# Altium footprint library WR-MPC3.PcbLib: 235 footprints (part 10 of 15)
Each footprint in its own frame and in the unit in brackets; x right, y up, seen from the top. Pads: shape width x height; smd on the part's side, far side on the other; paste and mask are expansions set on the pad; w line width, h text height; cw(c..) or ccw(c..) is an arc to the next point about the centre after c.
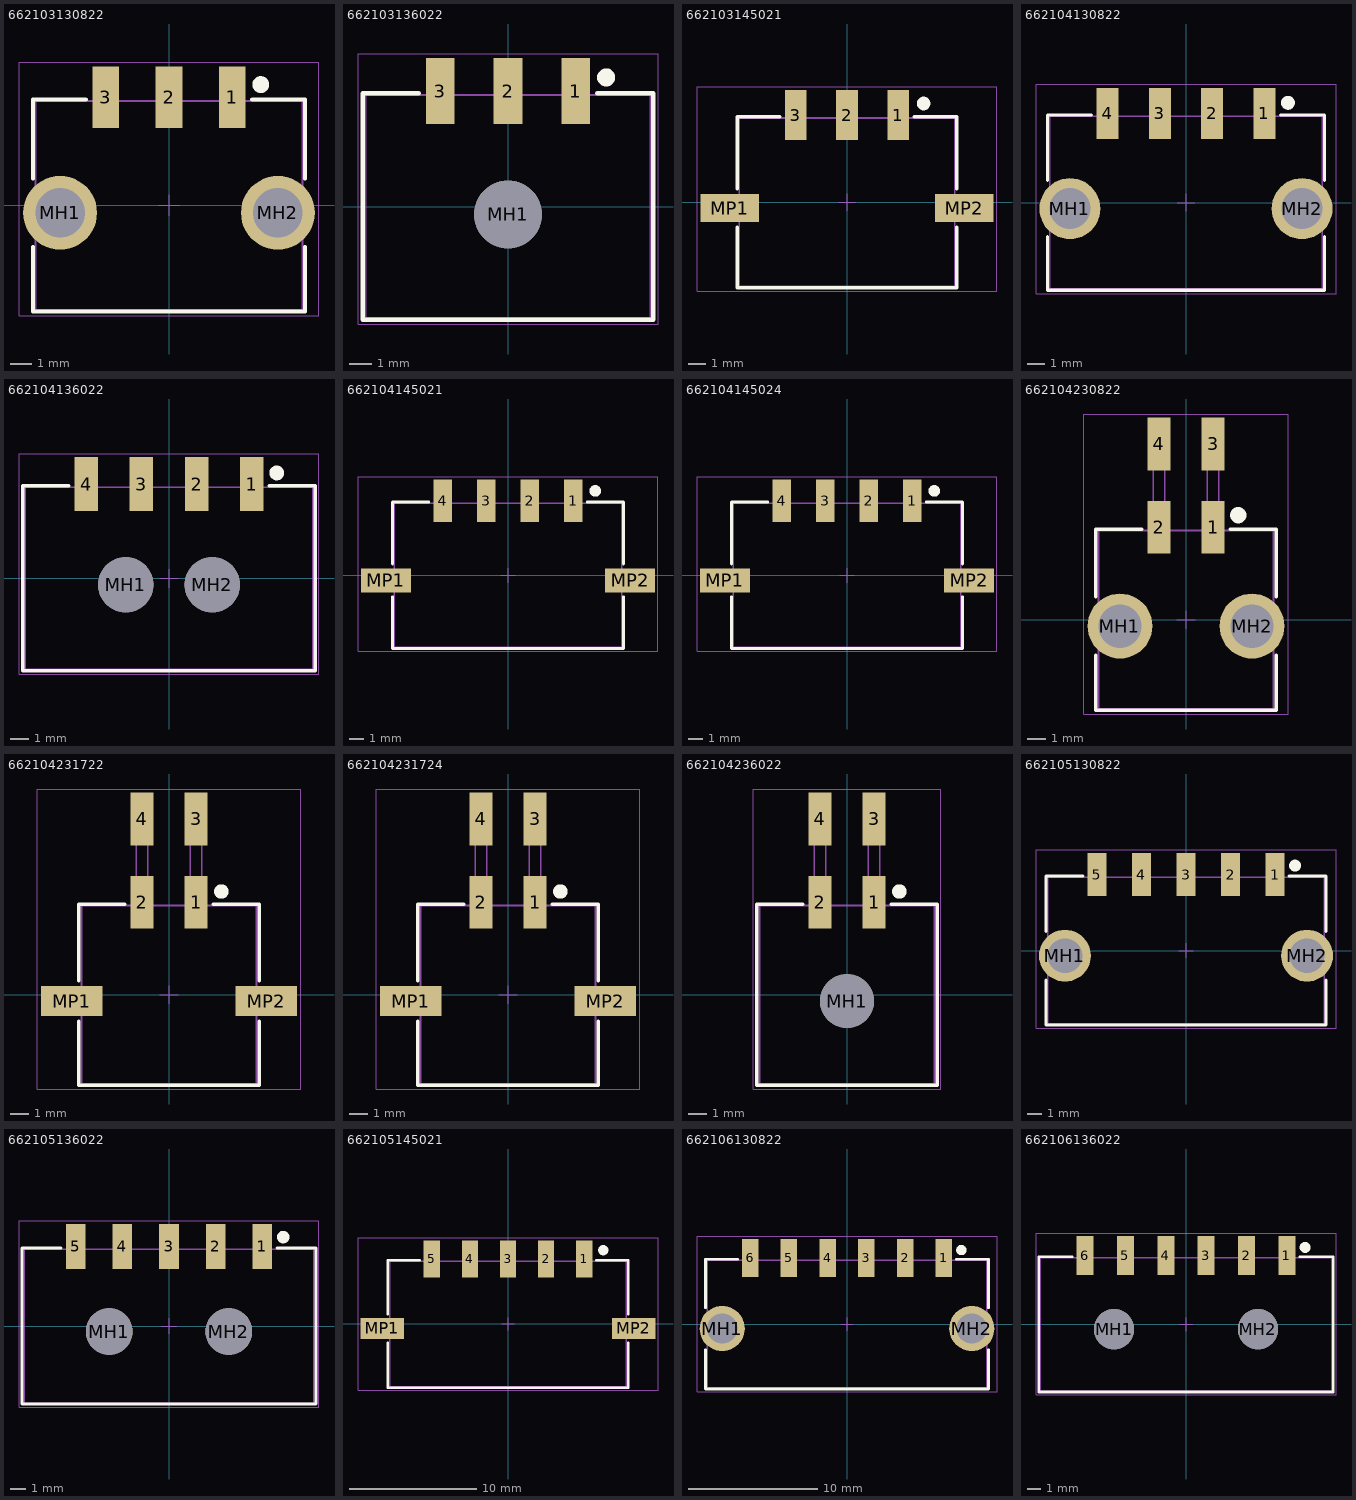
[diagram p9: the footprints below, top view; thin cyan lines are the x and y axes]

## 662103130822 [mm] "3.00mm SMT Male Single Row Angled Header with THT Retention Clip, 3p"
height 5.57
pads (5):
  rect 1.27x2.92 smd: 1(3,5.12) 2(0,5.12) 3(-3,5.12)
  round 3.5 hole 2.35: MH1(-5.16,-0.35) MH2(5.16,-0.35)
Top Overlay:
  circle w0.4: c4.35,5.725 r0.2
  lines w0.2: -6.45,-1.975 -6.45,-5.025 6.45,-5.025 6.45,-1.975 ; -6.45,1.275 -6.45,5.025 -3.95,5.025 ; 3.95,5.025 6.45,5.025 6.45,1.275
Top Designator:
  text ".Designator" at -7.498,-0.5 h1.5
Top Component Outline:
  lines w0.1: -3.32,4.95 -3.32,6.4 -2.68,6.4 -2.68,4.95 ; -0.32,4.95 -0.32,6.4 0.32,6.4 0.32,4.95 ; 2.68,4.95 2.68,6.4 3.32,6.4 3.32,4.95 ; -6.325,-4.95 6.325,-4.95 6.325,4.95 -6.325,4.95 -6.325,-4.95
Top 3D Body:
  lines w0.1: -3.32,4.95 -3.32,6.4 -2.68,6.4 -2.68,4.95 ; -0.32,4.95 -0.32,6.4 0.32,6.4 0.32,4.95 ; 2.68,4.95 2.68,6.4 3.32,6.4 3.32,4.95 ; -6.325,-4.95 6.325,-4.95 6.325,4.95 -6.325,4.95 -6.325,-4.95
Top Courtyard:
  lines w0.05: -7.11,-5.225 7.11,-5.225 7.11,6.78 -7.11,6.78 -7.11,-5.225
Top Component Center:
  lines w0.05: -0.5,0 0.5,0 ; 0,-0.5 0,0.5
3D body "662103130822.stp": height 5.61, standoff -2.01, extent -6.325,-4.95 6.325,6.398

## 662103136022 [mm] "3.00mm SMT Male Right Angled Header with Snap-In Plastic Pegs, 3p"
height 5.57
pads (4):
  rect 1.27x2.92 smd: 1(3,5.12) 2(0,5.12) 3(-3,5.12)
  round 3 hole 3 unplated: MH1(0,-0.35)
Top Overlay:
  circle w0.4: c4.35,5.725 r0.2
  lines w0.2: -3.95,5.025 -6.45,5.025 -6.45,-5.025 6.45,-5.025 6.45,5.025 3.95,5.025
Top Designator:
  text ".Designator" at -7.498,-0.5 h1.5
Top Component Outline:
  lines w0.1: -3.32,4.95 -3.32,6.4 -2.68,6.4 -2.68,4.95 ; -0.32,4.95 -0.32,6.4 0.32,6.4 0.32,4.95 ; 2.68,4.95 2.68,6.4 3.32,6.4 3.32,4.95 ; -6.325,-4.95 -6.325,4.95 6.325,4.95 6.325,-4.95 -6.325,-4.95
Top 3D Body:
  lines w0.1: -3.32,4.95 -3.32,6.4 -2.68,6.4 -2.68,4.95 ; -0.32,4.95 -0.32,6.4 0.32,6.4 0.32,4.95 ; 2.68,4.95 2.68,6.4 3.32,6.4 3.32,4.95 ; -6.325,-4.95 -6.325,4.95 6.325,4.95 6.325,-4.95 -6.325,-4.95
Top Courtyard:
  lines w0.05: -6.65,-5.225 -6.65,6.78 6.65,6.78 6.65,-5.225 -6.65,-5.225
Top Component Center:
  lines w0.05: -0.5,0 0.5,0 ; 0,-0.5 0,0.5
3D body "662103136022.stp": height 5.6, standoff -3.17, extent -6.325,-4.95 6.325,6.398

## 662103145021 [mm] "3.00mm Male Single Row Angled Header, 3p"
height 5.57
pads (5):
  rect 1.27x2.92 smd: 1(3,5.12) 2(0,5.12) 3(-3,5.12)
  rect 3.43x1.65 smd: MP1(-6.895,-0.35) MP2(6.895,-0.35)
Top Overlay:
  circle w0.4: c4.5,5.8 r0.2
  lines w0.2: -6.45,-1.475 -6.45,-5.025 6.45,-5.025 6.45,-1.475 ; -6.45,0.775 -6.45,5.025 -3.95,5.025 ; 3.95,5.025 6.45,5.025 6.45,0.775
Top Designator:
  text ".Designator" at -7.498,-0.5 h1.5
Top Component Outline:
  lines w0.1: -6.325,-1 -8.325,-1 -8.325,0.3 -6.325,0.3 ; -3.32,4.95 -3.32,6.4 -2.68,6.4 -2.68,4.95 ; -0.32,4.95 -0.32,6.4 0.32,6.4 0.32,4.95 ; 2.68,4.95 2.68,6.4 3.32,6.4 3.32,4.95 ; 6.325,-1 8.325,-1 8.325,0.3 6.325,0.3 ; -6.325,-4.95 -6.325,4.95 6.325,4.95 6.325,-4.95 -6.325,-4.95
Top 3D Body:
  lines w0.1: -6.325,-1 -8.325,-1 -8.325,0.3 -6.325,0.3 ; -3.32,4.95 -3.32,6.4 -2.68,6.4 -2.68,4.95 ; -0.32,4.95 -0.32,6.4 0.32,6.4 0.32,4.95 ; 2.68,4.95 2.68,6.4 3.32,6.4 3.32,4.95 ; 6.325,-1 8.325,-1 8.325,0.3 6.325,0.3 ; -6.325,-4.95 -6.325,4.95 6.325,4.95 6.325,-4.95 -6.325,-4.95
Top Courtyard:
  lines w0.05: -8.81,-5.225 -8.81,6.78 8.81,6.78 8.81,-5.225 -8.81,-5.225
Top Component Center:
  lines w0.05: -0.5,0 0.5,0 ; 0,-0.5 0,0.5
3D body "662103145021.stp": height 5.61, standoff -0.03, extent -8.323,-4.95 8.323,6.403

## 662104130822 [mm] "3.00mm SMT Male Single Row Angled Header with THT Retention Clip, 4p"
height 5.57
pads (6):
  rect 1.27x2.92 smd: 1(4.5,5.12) 2(1.5,5.12) 3(-1.5,5.12) 4(-4.5,5.12)
  round 3.5 hole 2.35: MH1(-6.66,-0.35) MH2(6.66,-0.35)
Top Overlay:
  circle w0.4: c5.85,5.725 r0.2
  lines w0.2: -7.95,-1.975 -7.95,-5.025 7.95,-5.025 7.95,-1.975 ; -7.95,1.275 -7.95,5.025 -5.45,5.025 ; 5.45,5.025 7.95,5.025 7.95,1.275
Top Designator:
  text ".Designator" at -7.498,-0.5 h1.5
Top Component Outline:
  lines w0.1: -4.82,4.95 -4.82,6.4 -4.18,6.4 -4.18,4.95 ; -1.82,4.95 -1.82,6.4 -1.18,6.4 -1.18,4.95 ; 1.18,4.95 1.18,6.4 1.82,6.4 1.82,4.95 ; 4.18,4.95 4.18,6.4 4.82,6.4 4.82,4.95 ; -7.825,-4.95 7.825,-4.95 7.825,4.95 -7.825,4.95 -7.825,-4.95
Top 3D Body:
  lines w0.1: -4.82,4.95 -4.82,6.4 -4.18,6.4 -4.18,4.95 ; -1.82,4.95 -1.82,6.4 -1.18,6.4 -1.18,4.95 ; 1.18,4.95 1.18,6.4 1.82,6.4 1.82,4.95 ; 4.18,4.95 4.18,6.4 4.82,6.4 4.82,4.95 ; -7.825,-4.95 -7.825,4.95 7.825,4.95 7.825,-4.95 -7.825,-4.95
Top Courtyard:
  lines w0.05: -8.61,-5.225 -8.61,6.78 8.61,6.78 8.61,-5.225 -8.61,-5.225
Top Component Center:
  lines w0.05: -0.5,0 0.5,0 ; 0,-0.5 0,0.5
3D body "662104130822.stp": height 5.61, standoff -2.01, extent -7.825,-4.95 7.825,6.398

## 662104136022 [mm] "3.00mm SMT Male Right Angled Header with Snap-In Plastic Pegs, 4p"
height 5.57
pads (6):
  rect 1.27x2.92 smd: 1(4.5,5.12) 2(1.5,5.12) 3(-1.5,5.12) 4(-4.5,5.12)
  round 3 hole 3 unplated: MH1(-2.35,-0.35) MH2(2.35,-0.35)
Top Overlay:
  circle w0.4: c5.85,5.725 r0.2
  lines w0.2: -5.45,5.025 -7.95,5.025 -7.95,-5.025 7.95,-5.025 7.95,5.025 5.45,5.025
Top Designator:
  text ".Designator" at -7.498,-0.5 h1.5
Top Component Outline:
  lines w0.1: -4.82,4.95 -4.82,6.4 -4.18,6.4 -4.18,4.95 ; -1.82,4.95 -1.82,6.4 -1.18,6.4 -1.18,4.95 ; 1.18,4.95 1.18,6.4 1.82,6.4 1.82,4.95 ; 4.18,4.95 4.18,6.4 4.82,6.4 4.82,4.95 ; -7.825,-4.95 -7.825,4.95 7.825,4.95 7.825,-4.95 -7.825,-4.95
Top 3D Body:
  lines w0.1: -4.82,4.95 -4.82,6.4 -4.18,6.4 -4.18,4.95 ; -1.82,4.95 -1.82,6.4 -1.18,6.4 -1.18,4.95 ; 1.18,4.95 1.18,6.4 1.82,6.4 1.82,4.95 ; 4.18,4.95 4.18,6.4 4.82,6.4 4.82,4.95 ; -7.825,-4.95 -7.825,4.95 7.825,4.95 7.825,-4.95 -7.825,-4.95
Top Courtyard:
  lines w0.05: -8.15,-5.225 -8.15,6.78 8.15,6.78 8.15,-5.225 -8.15,-5.225
Top Component Center:
  lines w0.05: -0.5,0 0.5,0 ; 0,-0.5 0,0.5
3D body "662104136022.stp": height 5.6, standoff -3.17, extent -7.825,-4.95 7.825,6.398

## 662104145021 [mm] "3.00mm Male Single Row Angled Header, 4p"
height 5.57
pads (6):
  rect 1.27x2.92 smd: 1(4.5,5.12) 2(1.5,5.12) 3(-1.5,5.12) 4(-4.5,5.12)
  rect 3.43x1.65 smd: MP1(-8.395,-0.35) MP2(8.395,-0.35)
Top Overlay:
  circle w0.4: c6,5.8 r0.2
  lines w0.2: -7.95,-1.475 -7.95,-5.025 7.95,-5.025 7.95,-1.475 ; -7.95,0.775 -7.95,5.025 -5.45,5.025 ; 5.45,5.025 7.95,5.025 7.95,0.775
Top Designator:
  text ".Designator" at -7.498,-0.5 h1.5
Top Component Outline:
  lines w0.1: -7.825,-1 -9.825,-1 -9.825,0.3 -7.825,0.3 ; -4.82,4.95 -4.82,6.4 -4.18,6.4 -4.18,4.95 ; -1.82,4.95 -1.82,6.4 -1.18,6.4 -1.18,4.95 ; 1.18,4.95 1.18,6.4 1.82,6.4 1.82,4.95 ; 4.18,4.95 4.18,6.4 4.82,6.4 4.82,4.95 ; 7.825,-1 9.825,-1 9.825,0.3 7.825,0.3 ; -7.825,-4.95 7.825,-4.95 7.825,4.95 -7.825,4.95 -7.825,-4.95
Top 3D Body:
  lines w0.1: -7.825,-1 -9.825,-1 -9.825,0.3 -7.825,0.3 ; -4.82,4.95 -4.82,6.4 -4.18,6.4 -4.18,4.95 ; -1.82,4.95 -1.82,6.4 -1.18,6.4 -1.18,4.95 ; 1.18,4.95 1.18,6.4 1.82,6.4 1.82,4.95 ; 4.18,4.95 4.18,6.4 4.82,6.4 4.82,4.95 ; 7.825,-1 9.825,-1 9.825,0.3 7.825,0.3 ; -7.825,-4.95 7.825,-4.95 7.825,4.95 -7.825,4.95 -7.825,-4.95
Top Courtyard:
  lines w0.05: -10.31,-5.225 -10.31,6.78 10.31,6.78 10.31,-5.225 -10.31,-5.225
Top Component Center:
  lines w0.05: -0.5,0 0.5,0 ; 0,-0.5 0,0.5
3D body "662104145021.stp": height 5.61, standoff -0.03, extent -9.823,-4.95 9.823,6.403

## 662104145024 [mm] "3.00mm Male Single Row Angled Header, 4p"
height 5.57
pads (6):
  rect 1.27x2.92 smd: 1(4.5,5.12) 2(1.5,5.12) 3(-1.5,5.12) 4(-4.5,5.12)
  rect 3.43x1.65 smd: MP1(-8.395,-0.35) MP2(8.395,-0.35)
Top Overlay:
  circle w0.4: c6,5.8 r0.2
  lines w0.2: -7.95,-1.475 -7.95,-5.025 7.95,-5.025 7.95,-1.475 ; -7.95,0.775 -7.95,5.025 -5.45,5.025 ; 5.45,5.025 7.95,5.025 7.95,0.775
Top Designator:
  text ".Designator" at -7.498,-0.5 h1.5
Top Component Outline:
  lines w0.1: -7.825,-1 -9.825,-1 -9.825,0.3 -7.825,0.3 ; -4.82,4.95 -4.82,6.4 -4.18,6.4 -4.18,4.95 ; -1.82,4.95 -1.82,6.4 -1.18,6.4 -1.18,4.95 ; 1.18,4.95 1.18,6.4 1.82,6.4 1.82,4.95 ; 4.18,4.95 4.18,6.4 4.82,6.4 4.82,4.95 ; 7.825,-1 9.825,-1 9.825,0.3 7.825,0.3 ; -7.825,-4.95 7.825,-4.95 7.825,4.95 -7.825,4.95 -7.825,-4.95
Top 3D Body:
  lines w0.1: -7.825,-1 -9.825,-1 -9.825,0.3 -7.825,0.3 ; -4.82,4.95 -4.82,6.4 -4.18,6.4 -4.18,4.95 ; -1.82,4.95 -1.82,6.4 -1.18,6.4 -1.18,4.95 ; 1.18,4.95 1.18,6.4 1.82,6.4 1.82,4.95 ; 4.18,4.95 4.18,6.4 4.82,6.4 4.82,4.95 ; 7.825,-1 9.825,-1 9.825,0.3 7.825,0.3 ; -7.825,-4.95 7.825,-4.95 7.825,4.95 -7.825,4.95 -7.825,-4.95
Top Courtyard:
  lines w0.05: -10.31,-5.225 -10.31,6.78 10.31,6.78 10.31,-5.225 -10.31,-5.225
Top Component Center:
  lines w0.05: -0.5,0 0.5,0 ; 0,-0.5 0,0.5
3D body "662104145024.stp": height 5.61, standoff -0.03, extent -9.823,-4.95 9.823,6.403

## 662104230822 [mm] "3.00mm SMT Male Dual Row Angled Header with THT Retention Clip, 4p"
height 8.26
pads (6):
  rect 1.27x2.92 smd: 1(1.5,5.13) 2(-1.5,5.13) 3(1.5,9.75) 4(-1.5,9.75)
  round 3.6 hole 2.41: MH1(-3.66,-0.35) MH2(3.66,-0.35)
Top Overlay:
  circle w0.5: c2.9,5.8 r0.2
  lines w0.2: -5,-1.975 -5,-5.025 5,-5.025 5,-1.975 ; -5,1.275 -5,5.025 -2.45,5.025 ; 2.45,5.025 5,5.025 5,1.275
Top Designator:
  text ".Designator" at -7.498,-0.5 h1.5
Top Component Outline:
  lines w0.1: -1.82,4.95 -1.82,10.95 -1.18,10.95 -1.18,4.95 ; -1.82,6.3 -1.18,6.3 ; 1.18,4.95 1.18,10.95 1.82,10.95 1.82,4.95 ; 1.18,6.3 1.82,6.3 ; -4.85,-4.95 4.85,-4.95 4.85,4.95 -4.85,4.95 -4.85,-4.95
Top 3D Body:
  lines w0.1: -1.82,4.95 -1.82,10.95 -1.18,10.95 -1.18,4.95 ; -1.82,6.3 -1.18,6.3 ; 1.18,4.95 1.18,10.95 1.82,10.95 1.82,4.95 ; 1.18,6.3 1.82,6.3 ; -4.85,-4.95 4.85,-4.95 4.85,4.95 -4.85,4.95 -4.85,-4.95
Top Courtyard:
  lines w0.05: -5.66,-5.225 -5.66,11.41 5.66,11.41 5.66,-5.225 -5.66,-5.225
Top Component Center:
  lines w0.05: -0.5,0 0.5,0 ; 0,-0.5 0,0.5
3D body "662104230822.stp": height 8.79, standoff -3.07, extent -4.85,-4.95 4.85,10.95

## 662104231722 [mm] "3.00mm SMT Male Dual Row Angled Header with SMT Solder Tab (Reel), 4p"
height 8.26
pads (6):
  rect 1.27x2.92 smd: 1(1.5,5.13) 2(-1.5,5.13) 3(1.5,9.75) 4(-1.5,9.75)
  rect 3.43x1.65 smd: MP1(-5.395,-0.35) MP2(5.395,-0.35)
Top Overlay:
  circle w0.4: c2.9,5.725 r0.2
  lines w0.2: -5,-1.475 -5,-5.025 5,-5.025 5,-1.475 ; -5,0.775 -5,5.025 -2.45,5.025 ; 2.45,5.025 5,5.025 5,0.775
Top Designator:
  text ".Designator" at -7.498,-0.5 h1.5
Top Component Outline:
  lines w0.1: -4.85,-1.1 -6.55,-1.1 -6.55,0.4 -4.85,0.4 ; -1.82,4.95 -1.82,10.95 -1.18,10.95 -1.18,4.95 ; -1.82,6.3 -1.18,6.3 ; 1.18,4.95 1.18,10.95 1.82,10.95 1.82,4.95 ; 1.18,6.3 1.82,6.3 ; 4.85,-1.1 6.55,-1.1 6.55,0.4 4.85,0.4 ; -4.85,-4.95 -4.85,4.95 4.85,4.95 4.85,-4.95 -4.85,-4.95
Top 3D Body:
  lines w0.1: -4.85,-1.1 -6.55,-1.1 -6.55,0.4 -4.85,0.4 ; -1.82,4.95 -1.82,10.95 -1.18,10.95 -1.18,4.95 ; -1.82,6.3 -1.18,6.3 ; 1.18,4.95 1.18,10.95 1.82,10.95 1.82,4.95 ; 1.18,6.3 1.82,6.3 ; 4.85,-1.1 6.55,-1.1 6.55,0.4 4.85,0.4 ; -4.85,-4.95 -4.85,4.95 4.85,4.95 4.85,-4.95 -4.85,-4.95
Top Courtyard:
  lines w0.05: -7.31,-5.225 7.31,-5.225 7.31,11.41 -7.31,11.41 -7.31,-5.225
Top Component Center:
  lines w0.05: -0.5,0 0.5,0 ; 0,-0.5 0,0.5
3D body "662104231722.stp": height 8.78, standoff 0.02, extent -6.55,-4.95 6.55,10.95

## 662104231724 [mm] "3.00mm SMT Male Dual Row Angled Header with SMT Solder Tab (Reel), 4p"
height 8.26
pads (6):
  rect 1.27x2.92 smd: 1(1.5,5.13) 2(-1.5,5.13) 3(1.5,9.75) 4(-1.5,9.75)
  rect 3.43x1.65 smd: MP1(-5.395,-0.35) MP2(5.395,-0.35)
Top Overlay:
  circle w0.4: c2.9,5.725 r0.2
  lines w0.2: -5,-1.475 -5,-5.025 5,-5.025 5,-1.475 ; -5,0.775 -5,5.025 -2.45,5.025 ; 2.45,5.025 5,5.025 5,0.775
Top Designator:
  text ".Designator" at -7.498,-0.5 h1.5
Top Component Outline:
  lines w0.1: -4.85,-1.1 -6.55,-1.1 -6.55,0.4 -4.85,0.4 ; -1.82,4.95 -1.82,10.95 -1.18,10.95 -1.18,4.95 ; -1.82,6.3 -1.18,6.3 ; 1.18,4.95 1.18,10.95 1.82,10.95 1.82,4.95 ; 1.18,6.3 1.82,6.3 ; 4.85,-1.1 6.55,-1.1 6.55,0.4 4.85,0.4 ; -4.85,-4.95 -4.85,4.95 4.85,4.95 4.85,-4.95 -4.85,-4.95
Top 3D Body:
  lines w0.1: -4.85,-1.1 -6.55,-1.1 -6.55,0.4 -4.85,0.4 ; -1.82,4.95 -1.82,10.95 -1.18,10.95 -1.18,4.95 ; -1.82,6.3 -1.18,6.3 ; 1.18,4.95 1.18,10.95 1.82,10.95 1.82,4.95 ; 1.18,6.3 1.82,6.3 ; 4.85,-1.1 6.55,-1.1 6.55,0.4 4.85,0.4 ; -4.85,-4.95 -4.85,4.95 4.85,4.95 4.85,-4.95 -4.85,-4.95
Top Courtyard:
  lines w0.05: -7.31,-5.225 7.31,-5.225 7.31,11.41 -7.31,11.41 -7.31,-5.225
Top Component Center:
  lines w0.05: -0.5,0 0.5,0 ; 0,-0.5 0,0.5
3D body "662104231724.stp": height 8.76, standoff 0, extent -6.55,-4.95 6.55,10.95

## 662104236022 [mm] "3.00mm SMT Male Dual Row Angled Header with Plastic Pegs, 4p"
height 8.26
pads (5):
  rect 1.27x2.92 smd: 1(1.5,5.13) 2(-1.5,5.13) 3(1.5,9.75) 4(-1.5,9.75)
  round 3 hole 3 unplated: MH1(0,-0.35)
Top Overlay:
  circle w0.4: c2.9,5.725 r0.2
  lines w0.2: -2.45,5.025 -5,5.025 -5,-5.025 5,-5.025 5,5.025 2.45,5.025
Top Designator:
  text ".Designator" at -7.498,-0.5 h1.5
Top Component Outline:
  lines w0.1: -1.82,4.95 -1.82,10.95 -1.18,10.95 -1.18,4.95 ; -1.82,6.3 -1.18,6.3 ; 1.18,4.95 1.18,10.95 1.82,10.95 1.82,4.95 ; 1.18,6.3 1.82,6.3 ; -4.85,-4.95 4.85,-4.95 4.85,4.95 -4.85,4.95 -4.85,-4.95
Top 3D Body:
  lines w0.1: -1.82,4.95 -1.82,10.95 -1.18,10.95 -1.18,4.95 ; -1.82,6.3 -1.18,6.3 ; 1.18,4.95 1.18,10.95 1.82,10.95 1.82,4.95 ; 1.18,6.3 1.82,6.3 ; -4.85,-4.95 4.85,-4.95 4.85,4.95 -4.85,4.95 -4.85,-4.95
Top Courtyard:
  lines w0.05: -5.2,-5.225 -5.2,11.41 5.2,11.41 5.2,-5.225 -5.2,-5.225
Top Component Center:
  lines w0.05: -0.5,0 0.5,0 ; 0,-0.5 0,0.5
3D body "662104236022.stp": height 8.79, standoff -3.17, extent -4.85,-4.95 4.85,10.95

## 662105130822 [mm] "3.00mm SMT Male Single Row Angled Header with THT Retention Clip, 5p"
height 5.57
pads (7):
  rect 1.27x2.92 smd: 1(6,5.12) 2(3,5.12) 3(0,5.12) 4(-3,5.12) 5(-6,5.12)
  round 3.5 hole 2.35: MH1(-8.16,-0.35) MH2(8.16,-0.35)
Top Overlay:
  circle w0.4: c7.35,5.725 r0.2
  lines w0.2: -9.45,-1.975 -9.45,-5.025 9.45,-5.025 9.45,-1.975 ; -9.45,1.275 -9.45,5.025 -6.95,5.025 ; 6.95,5.025 9.45,5.025 9.45,1.275
Top Designator:
  text ".Designator" at -7.498,-0.5 h1.5
Top Component Outline:
  lines w0.1: -6.32,4.95 -6.32,6.4 -5.68,6.4 -5.68,4.95 ; -3.32,4.95 -3.32,6.4 -2.68,6.4 -2.68,4.95 ; -0.32,4.95 -0.32,6.4 0.32,6.4 0.32,4.95 ; 2.68,4.95 2.68,6.4 3.32,6.4 3.32,4.95 ; 5.68,4.95 5.68,6.4 6.32,6.4 6.32,4.95 ; -9.325,-4.95 9.325,-4.95 9.325,4.95 -9.325,4.95 -9.325,-4.95
Top 3D Body:
  lines w0.1: -6.32,4.95 -6.32,6.4 -5.68,6.4 -5.68,4.95 ; -3.32,4.95 -3.32,6.4 -2.68,6.4 -2.68,4.95 ; -0.32,4.95 -0.32,6.4 0.32,6.4 0.32,4.95 ; 2.68,4.95 2.68,6.4 3.32,6.4 3.32,4.95 ; 5.68,4.95 5.68,6.4 6.32,6.4 6.32,4.95 ; -9.325,-4.95 9.325,-4.95 9.325,4.95 -9.325,4.95 -9.325,-4.95
Top Courtyard:
  lines w0.05: -10.11,-5.225 10.11,-5.225 10.11,6.78 -10.11,6.78 -10.11,-5.225
Top Component Center:
  lines w0.05: -0.5,0 0.5,0 ; 0,-0.5 0,0.5
3D body "662105130822.stp": height 5.61, standoff -2.01, extent -9.325,-4.95 9.325,6.398

## 662105136022 [mm] "3.00mm SMT Male Right Angled Header with Snap-In Plastic Pegs, 5p"
height 5.57
pads (7):
  rect 1.27x2.92 smd: 1(6,5.12) 2(3,5.12) 3(0,5.12) 4(-3,5.12) 5(-6,5.12)
  round 3 hole 3 unplated: MH1(-3.85,-0.35) MH2(3.85,-0.35)
Top Overlay:
  circle w0.4: c7.35,5.725 r0.2
  lines w0.2: -6.95,5.025 -9.45,5.025 -9.45,-5.025 9.45,-5.025 9.45,5.025 6.95,5.025
Top Designator:
  text ".Designator" at -7.498,-0.5 h1.5
Top Component Outline:
  lines w0.1: -6.32,4.95 -6.32,6.4 -5.68,6.4 -5.68,4.95 ; -3.32,4.95 -3.32,6.4 -2.68,6.4 -2.68,4.95 ; -0.32,4.95 -0.32,6.4 0.32,6.4 0.32,4.95 ; 2.68,4.95 2.68,6.4 3.32,6.4 3.32,4.95 ; 5.68,4.95 5.68,6.4 6.32,6.4 6.32,4.95 ; -9.325,-4.95 9.325,-4.95 9.325,4.95 -9.325,4.95 -9.325,-4.95
Top 3D Body:
  lines w0.1: -6.32,4.95 -6.32,6.4 -5.68,6.4 -5.68,4.95 ; -3.32,4.95 -3.32,6.4 -2.68,6.4 -2.68,4.95 ; -0.32,4.95 -0.32,6.4 0.32,6.4 0.32,4.95 ; 2.68,4.95 2.68,6.4 3.32,6.4 3.32,4.95 ; 5.68,4.95 5.68,6.4 6.32,6.4 6.32,4.95 ; -9.325,-4.95 -9.325,4.95 9.325,4.95 9.325,-4.95 -9.325,-4.95
Top Courtyard:
  lines w0.05: -9.65,-5.225 -9.65,6.78 9.65,6.78 9.65,-5.225 -9.65,-5.225
Top Component Center:
  lines w0.05: -0.5,0 0.5,0 ; 0,-0.5 0,0.5
3D body "662105136022.stp": height 5.6, standoff -3.17, extent -9.325,-4.95 9.325,6.398

## 662105145021 [mm] "3.00mm Male Single Row Angled Header, 5p"
height 5.57
pads (7):
  rect 1.27x2.92 smd: 1(6,5.12) 2(3,5.12) 3(0,5.12) 4(-3,5.12) 5(-6,5.12)
  rect 3.43x1.65 smd: MP1(-9.895,-0.35) MP2(9.895,-0.35)
Top Overlay:
  circle w0.4: c7.5,5.8 r0.2
  lines w0.2: -9.45,-1.475 -9.45,-5.025 9.45,-5.025 9.45,-1.475 ; -9.45,0.775 -9.45,5.025 -6.95,5.025 ; 6.95,5.025 9.45,5.025 9.45,0.775
Top Designator:
  text ".Designator" at -7.498,-0.5 h1.5
Top Component Outline:
  lines w0.1: -9.325,-1 -11.325,-1 -11.325,0.3 -9.325,0.3 ; -6.32,4.95 -6.32,6.4 -5.68,6.4 -5.68,4.95 ; -3.32,4.95 -3.32,6.4 -2.68,6.4 -2.68,4.95 ; -0.32,4.95 -0.32,6.4 0.32,6.4 0.32,4.95 ; 2.68,4.95 2.68,6.4 3.32,6.4 3.32,4.95 ; 5.68,4.95 5.68,6.4 6.32,6.4 6.32,4.95 ; 9.325,-1 11.325,-1 11.325,0.3 9.325,0.3 ; -9.325,-4.95 -9.325,4.95 9.325,4.95 9.325,-4.95 -9.325,-4.95
Top 3D Body:
  lines w0.1: -9.325,-1 -11.325,-1 -11.325,0.3 -9.325,0.3 ; -6.32,4.95 -6.32,6.4 -5.68,6.4 -5.68,4.95 ; -3.32,4.95 -3.32,6.4 -2.68,6.4 -2.68,4.95 ; -0.32,4.95 -0.32,6.4 0.32,6.4 0.32,4.95 ; 2.68,4.95 2.68,6.4 3.32,6.4 3.32,4.95 ; 5.68,4.95 5.68,6.4 6.32,6.4 6.32,4.95 ; 9.325,-1 11.325,-1 11.325,0.3 9.325,0.3 ; -9.325,-4.95 9.325,-4.95 9.325,4.95 -9.325,4.95 -9.325,-4.95
Top Courtyard:
  lines w0.05: -11.81,-5.225 11.81,-5.225 11.81,6.78 -11.81,6.78 -11.81,-5.225
Top Component Center:
  lines w0.05: -0.5,0 0.5,0 ; 0,-0.5 0,0.5
3D body "662105145021.stp": height 5.61, standoff -0.03, extent -11.323,-4.95 11.323,6.403

## 662106130822 [mm] "3.00mm SMT Male Single Row Angled Header with THT Retention Clip, 6p"
height 5.57
pads (8):
  rect 1.27x2.92 smd: 1(7.5,5.12) 2(4.5,5.12) 3(1.5,5.12) 4(-1.5,5.12) 5(-4.5,5.12) 6(-7.5,5.12)
  round 3.5 hole 2.35: MH1(-9.66,-0.35) MH2(9.66,-0.35)
Top Overlay:
  circle w0.4: c8.85,5.725 r0.2
  lines w0.2: -10.95,-1.975 -10.95,-5.025 10.95,-5.025 10.95,-1.975 ; -10.95,1.275 -10.95,5.025 -8.45,5.025 ; 8.45,5.025 10.95,5.025 10.95,1.275
Top Designator:
  text ".Designator" at -7.498,-0.5 h1.5
Top Component Outline:
  lines w0.1: -7.82,4.95 -7.82,6.4 -7.18,6.4 -7.18,4.95 ; -4.82,4.95 -4.82,6.4 -4.18,6.4 -4.18,4.95 ; -1.82,4.95 -1.82,6.4 -1.18,6.4 -1.18,4.95 ; 1.18,4.95 1.18,6.4 1.82,6.4 1.82,4.95 ; 4.18,4.95 4.18,6.4 4.82,6.4 4.82,4.95 ; 7.18,4.95 7.18,6.4 7.82,6.4 7.82,4.95 ; -10.825,-4.95 -10.825,4.95 10.825,4.95 10.825,-4.95 -10.825,-4.95
Top 3D Body:
  lines w0.1: -7.82,4.95 -7.82,6.4 -7.18,6.4 -7.18,4.95 ; -4.82,4.95 -4.82,6.4 -4.18,6.4 -4.18,4.95 ; -1.82,4.95 -1.82,6.4 -1.18,6.4 -1.18,4.95 ; 1.18,4.95 1.18,6.4 1.82,6.4 1.82,4.95 ; 4.18,4.95 4.18,6.4 4.82,6.4 4.82,4.95 ; 7.18,4.95 7.18,6.4 7.82,6.4 7.82,4.95 ; -10.825,-4.95 -10.825,4.95 10.825,4.95 10.825,-4.95 -10.825,-4.95
Top Courtyard:
  lines w0.05: -11.61,-5.225 -11.61,6.78 11.61,6.78 11.61,-5.225 -11.61,-5.225
Top Component Center:
  lines w0.05: -0.5,0 0.5,0 ; 0,-0.5 0,0.5
3D body "662106130822.stp": height 5.61, standoff -2.01, extent -10.825,-4.95 10.825,6.398

## 662106136022 [mm] "3.00mm SMT Male Right Angled Header with Snap-In Plastic Pegs, 6p"
height 5.57
pads (8):
  rect 1.27x2.92 smd: 1(7.5,5.12) 2(4.5,5.12) 3(1.5,5.12) 4(-1.5,5.12) 5(-4.5,5.12) 6(-7.5,5.12)
  round 3 hole 3 unplated: MH1(-5.35,-0.35) MH2(5.35,-0.35)
Top Overlay:
  circle w0.4: c8.85,5.725 r0.2
  lines w0.2: -8.45,5.025 -10.95,5.025 -10.95,-5.025 10.95,-5.025 10.95,5.025 8.45,5.025
Top Designator:
  text ".Designator" at -7.498,-0.5 h1.5
Top Component Outline:
  lines w0.1: -7.82,4.95 -7.82,6.4 -7.18,6.4 -7.18,4.95 ; -4.82,4.95 -4.82,6.4 -4.18,6.4 -4.18,4.95 ; -1.82,4.95 -1.82,6.4 -1.18,6.4 -1.18,4.95 ; 1.18,4.95 1.18,6.4 1.82,6.4 1.82,4.95 ; 4.18,4.95 4.18,6.4 4.82,6.4 4.82,4.95 ; 7.18,4.95 7.18,6.4 7.82,6.4 7.82,4.95 ; -10.825,-4.95 -10.825,4.95 10.825,4.95 10.825,-4.95 -10.825,-4.95
Top 3D Body:
  lines w0.1: -7.82,4.95 -7.82,6.4 -7.18,6.4 -7.18,4.95 ; -4.82,4.95 -4.82,6.4 -4.18,6.4 -4.18,4.95 ; -1.82,4.95 -1.82,6.4 -1.18,6.4 -1.18,4.95 ; 1.18,4.95 1.18,6.4 1.82,6.4 1.82,4.95 ; 4.18,4.95 4.18,6.4 4.82,6.4 4.82,4.95 ; 7.18,4.95 7.18,6.4 7.82,6.4 7.82,4.95 ; -10.825,-4.95 -10.825,4.95 10.825,4.95 10.825,-4.95 -10.825,-4.95
Top Courtyard:
  lines w0.05: -11.15,-5.225 -11.15,6.78 11.15,6.78 11.15,-5.225 -11.15,-5.225
Top Component Center:
  lines w0.05: -0.5,0 0.5,0 ; 0,-0.5 0,0.5
3D body "662106136022.stp": height 5.6, standoff -3.17, extent -10.825,-4.95 10.825,6.398